# Altium footprint library Verdin Development Board.PcbLib: 154 footprints (part 9 of 10)
Each footprint in its own frame and in the unit in brackets; x right, y up, seen from the top. Pads: shape width x height; smd on the part's side, far side on the other; paste and mask are expansions set on the pad; w line width, h text height; cw(c..) or ccw(c..) is an arc to the next point about the centre after c.
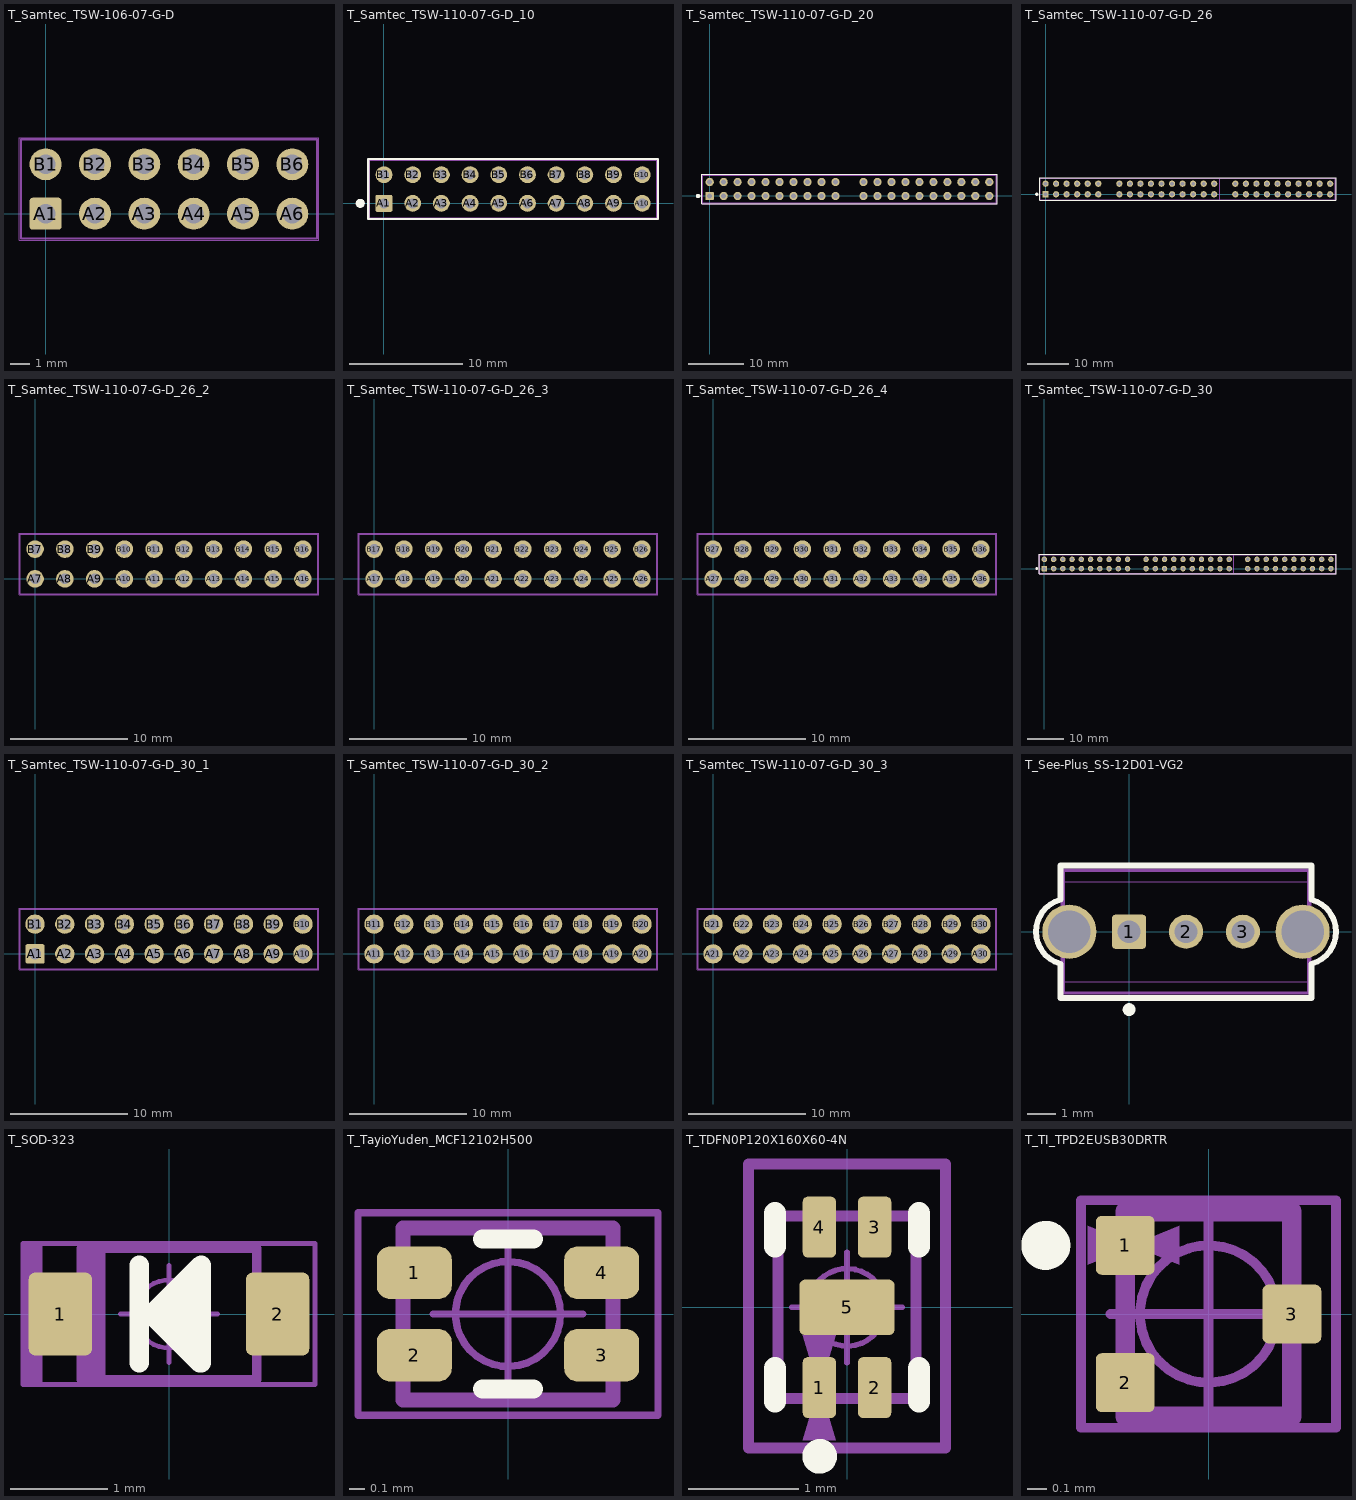
[diagram p8: the footprints below, top view; thin cyan lines are the x and y axes]

## T_Samtec_TSW-106-07-G-D [mm]
pads (12):
  rrect20% 1.65x1.65 hole 1: A1(0,0)
  round 1.65 hole 1: A2(2.54,0) A3(5.08,0) A4(7.62,0) A5(10.16,0) A6(12.7,0) B1(0,2.54) B2(2.54,2.54) B3(5.08,2.54) B4(7.62,2.54) B5(10.16,2.54) B6(12.7,2.54)
Top Component Outline:
  lines w0.05: -1.37,-1.37 -1.37,3.91 14.072,3.91 14.072,-1.37 -1.37,-1.37
Top 3D Body:
  lines w0.001: -1.27,-1.27 -1.27,3.81 13.97,3.81 13.97,-1.27 -1.27,-1.27
Top Dimensions:
  lines w0.1: -1.27,-1.27 13.97,-1.27 13.97,3.81 -1.27,3.81 -1.27,-1.27
Top Component Center:
  circle w0.05: c0,0 r0.35
  lines w0.05: -0.5,0 0.5,0 ; 0,-0.5 0,0.5
Top Assembly:
  text ".Designator" at 4.445,4.445 h0.75
3D body "TSW-106-07-G-D.stp": height 8.39, standoff -2.53, extent -1.27,-1.27 13.97,3.81

## T_Samtec_TSW-110-07-G-D_10 [mm]
pads (20):
  rrect20% 1.5x1.5 hole 0.9: A1(0,0)
  round 1.5 hole 0.9: A2(2.54,0) A3(5.08,0) A4(7.62,0) A5(10.16,0) A6(12.7,0) A7(15.24,0) A8(17.78,0) A9(20.32,0) A10(22.86,0) B1(0,2.54) B2(2.54,2.54) B3(5.08,2.54) B4(7.62,2.54) B5(10.16,2.54) B6(12.7,2.54) B7(15.24,2.54) B8(17.78,2.54) B9(20.32,2.54) B10(22.86,2.54)
Top Overlay:
  circle w0.4: c-2.1,0 r0.2
  lines w0.2: -1.395,-1.395 -1.395,3.935 24.257,3.935 24.257,-1.395 -1.395,-1.395
Top Component Outline:
  lines w0.05: -1.37,-1.37 -1.37,3.91 24.257,3.91 24.257,-1.37 -1.37,-1.37
Top 3D Body:
  lines w0.001: -1.27,-1.27 -1.27,3.81 24.13,3.81 24.13,-1.27 -1.27,-1.27
Top Dimensions:
  lines w0.1: -1.27,-1.27 24.13,-1.27 24.13,3.81 -1.27,3.81 -1.27,-1.27
Top Component Center:
  circle w0.05: c0,0 r0.35
  lines w0.05: -0.5,0 0.5,0 ; 0,-0.5 0,0.5
Top Assembly:
  text ".Designator" at 9.225,4.225 h0.75
3D body "Samtec-TSW-110-07-G-D.step": height 8.4, standoff -2.52, extent -1.27,-1.27 24.13,3.81

## T_Samtec_TSW-110-07-G-D_20 [mm]
pads (40):
  rrect20% 1.5x1.5 hole 0.9: A1(0,0)
  round 1.5 hole 0.9: A2(2.54,0) A3(5.08,0) A4(7.62,0) A5(10.16,0) A6(12.7,0) A7(15.24,0) A8(17.78,0) A9(20.32,0) A10(22.86,0) A11(27.94,0) A12(30.48,0) A13(33.02,0) A14(35.56,0) A15(38.1,0) A16(40.64,0) A17(43.18,0) A18(45.72,0) A19(48.26,0) A20(50.8,0) B1(0,2.54) B2(2.54,2.54) B3(5.08,2.54) B4(7.62,2.54) B5(10.16,2.54) B6(12.7,2.54) B7(15.24,2.54) B8(17.78,2.54) B9(20.32,2.54) B10(22.86,2.54) B11(27.94,2.54) B12(30.48,2.54) B13(33.02,2.54) B14(35.56,2.54) B15(38.1,2.54) B16(40.64,2.54) B17(43.18,2.54) B18(45.72,2.54) B19(48.26,2.54) B20(50.8,2.54)
Top Overlay:
  circle w0.4: c-2.1,0 r0.2
  lines w0.2: -1.395,-1.395 -1.395,3.935 52.195,3.935 52.195,-1.395 -1.395,-1.395
Top Component Outline:
  lines w0.05: -1.37,-1.37 -1.37,3.91 52.17,3.91 52.17,-1.37 -1.37,-1.37
Top 3D Body:
  lines w0.001: 52.07,-1.27 -1.27,-1.27 -1.27,3.81 52.07,3.81 ; 52.07,-1.27 52.07,3.81 ; 52.07,-1.27 52.07,3.81
Top Dimensions:
  lines w0.1: -1.27,-1.27 52.07,-1.27 52.07,3.81 -1.27,3.81 -1.27,-1.27
Top Component Center:
  circle w0.05: c0,0 r0.35
  lines w0.05: -0.5,0 0.5,0 ; 0,-0.5 0,0.5
Top Assembly:
  text ".Designator" at 23.625,4.425 h0.75
3D body "Samtec-TSW-110-07-G-D.step": height 8.4, standoff -2.52, extent 26.67,-1.27 52.07,3.81
3D body "Samtec-TSW-110-07-G-D.step": height 8.4, standoff -2.52, extent -1.27,-1.27 24.13,3.81

## T_Samtec_TSW-110-07-G-D_26 [mm]
pads (52):
  rrect20% 1.5x1.5 hole 0.9: A1(0,0)
  round 1.5 hole 0.9: A2(2.54,0) A3(5.08,0) A4(7.62,0) A5(10.16,0) A6(12.7,0) A7(17.78,0) A8(20.32,0) A9(22.86,0) A10(25.4,0) A11(27.94,0) A12(30.48,0) A13(33.02,0) A14(35.56,0) A15(38.1,0) A16(40.64,0) A17(45.72,0) A18(48.26,0) A19(50.8,0) A20(53.34,0) A21(55.88,0) A22(58.42,0) A23(60.96,0) A24(63.5,0) A25(66.04,0) A26(68.58,0) B1(0,2.54) B2(2.54,2.54) B3(5.08,2.54) B4(7.62,2.54) B5(10.16,2.54) B6(12.7,2.54) B7(17.78,2.54) B8(20.32,2.54) B9(22.86,2.54) B10(25.4,2.54) B11(27.94,2.54) B12(30.48,2.54) B13(33.02,2.54) B14(35.56,2.54) B15(38.1,2.54) B16(40.64,2.54) B17(45.72,2.54) B18(48.26,2.54) B19(50.8,2.54) B20(53.34,2.54) B21(55.88,2.54) B22(58.42,2.54) B23(60.96,2.54) B24(63.5,2.54) B25(66.04,2.54) B26(68.58,2.54)
Top Overlay:
  circle w0.4: c-2.1,0 r0.2
  lines w0.2: 69.952,-1.395 -1.395,-1.395 -1.395,3.935 69.977,3.935 69.977,-1.395
Top Component Outline:
  lines w0.05: -1.37,-1.37 69.952,-1.37 69.952,3.91 -1.37,3.91 -1.37,-1.37
Top 3D Body:
  lines w0.001: 52.07,-1.27 -1.27,-1.27 -1.27,3.81 52.07,3.81 ; 41.91,-1.27 41.91,3.81 41.91,-1.27
Top Dimensions:
  lines w0.1: -1.27,-1.27 -1.27,3.81 69.85,3.81 69.85,-1.27 -1.27,-1.27
Top Component Center:
  circle w0.05: c0,0 r0.35
  lines w0.05: -0.5,0 0.5,0 ; 0,-0.5 0,0.5
Top Assembly:
  text ".Designator" at 33.02,4.445 h0.75
3D body "TSW-106-07-G-D.stp": height 8.39, standoff -2.53, extent -1.27,-1.27 13.97,3.81
3D body "Samtec-TSW-110-07-G-D.step": height 8.4, standoff -2.52, extent 44.45,-1.27 69.85,3.81
3D body "Samtec-TSW-110-07-G-D.step": height 8.4, standoff -2.52, extent 16.51,-1.27 41.91,3.81

## T_Samtec_TSW-110-07-G-D_26_2 [mm]
pads (20):
  round 1.5 hole 0.9: A7(0,0) A8(2.54,0) A9(5.08,0) A10(7.62,0) A11(10.16,0) A12(12.7,0) A13(15.24,0) A14(17.78,0) A15(20.32,0) A16(22.86,0) B7(0,2.54) B8(2.54,2.54) B9(5.08,2.54) B10(7.62,2.54) B11(10.16,2.54) B12(12.7,2.54) B13(15.24,2.54) B14(17.78,2.54) B15(20.32,2.54) B16(22.86,2.54)
Top Component Outline:
  lines w0.05: -1.372,-1.37 24.232,-1.37 24.232,3.91 -1.372,3.91 -1.372,-1.37
Top 3D Body:
  lines w0.001: 24.13,-1.27 24.13,3.81 ; 24.13,-1.27 24.13,3.81 ; 24.13,-1.27 -1.27,-1.27 -1.27,3.81 24.13,3.81
Top Dimensions:
  lines w0.1: -1.27,-1.27 -1.27,3.81 24.13,3.81 24.13,-1.27 -1.27,-1.27
Top Component Center:
  circle w0.05: c0,0 r0.35
  lines w0.05: -0.5,0 0.5,0 ; 0,-0.5 0,0.5
Top Assembly:
  text ".Designator" at 10.795,4.445 h0.75
3D body "Samtec-TSW-110-07-G-D.step": height 8.4, standoff -2.52, extent -1.27,-1.27 24.13,3.81

## T_Samtec_TSW-110-07-G-D_26_3 [mm]
pads (20):
  round 1.5 hole 0.9: A17(0,0) A18(2.54,0) A19(5.08,0) A20(7.62,0) A21(10.16,0) A22(12.7,0) A23(15.24,0) A24(17.78,0) A25(20.32,0) A26(22.86,0) B17(0,2.54) B18(2.54,2.54) B19(5.08,2.54) B20(7.62,2.54) B21(10.16,2.54) B22(12.7,2.54) B23(15.24,2.54) B24(17.78,2.54) B25(20.32,2.54) B26(22.86,2.54)
Top Component Outline:
  lines w0.05: -1.37,-1.37 -1.37,3.91 24.232,3.91 24.232,-1.37 -1.37,-1.37
Top 3D Body:
  lines w0.001: -1.27,-1.27 -1.27,3.81 24.13,3.81 24.13,-1.27 -1.27,-1.27
Top Dimensions:
  lines w0.1: -1.27,-1.27 24.13,-1.27 24.13,3.81 -1.27,3.81 -1.27,-1.27
Top Component Center:
  circle w0.05: c0,0 r0.35
  lines w0.05: -0.5,0 0.5,0 ; 0,-0.5 0,0.5
Top Assembly:
  text ".Designator" at 10.16,4.445 h0.75
3D body "Samtec-TSW-110-07-G-D.step": height 8.4, standoff -2.52, extent -1.27,-1.27 24.13,3.81

## T_Samtec_TSW-110-07-G-D_26_4 [mm]
pads (20):
  round 1.5 hole 0.9: A27(0,0) A28(2.54,0) A29(5.08,0) A30(7.62,0) A31(10.16,0) A32(12.7,0) A33(15.24,0) A34(17.78,0) A35(20.32,0) A36(22.86,0) B27(0,2.54) B28(2.54,2.54) B29(5.08,2.54) B30(7.62,2.54) B31(10.16,2.54) B32(12.7,2.54) B33(15.24,2.54) B34(17.78,2.54) B35(20.32,2.54) B36(22.86,2.54)
Top Component Outline:
  lines w0.05: -1.37,-1.37 24.232,-1.37 24.232,3.91 -1.37,3.91 -1.37,-1.37
Top 3D Body:
  lines w0.001: -1.27,-1.27 24.13,-1.27 24.13,3.81 -1.27,3.81 -1.27,-1.27
Top Dimensions:
  lines w0.1: -1.27,-1.27 -1.27,3.81 24.13,3.81 24.13,-1.27 -1.27,-1.27
Top Component Center:
  circle w0.05: c0,0 r0.35
  lines w0.05: -0.5,0 0.5,0 ; 0,-0.5 0,0.5
Top Assembly:
  text ".Designator" at 10.16,4.445 h0.75
3D body "Samtec-TSW-110-07-G-D.step": height 8.4, standoff -2.52, extent -1.27,-1.27 24.13,3.81

## T_Samtec_TSW-110-07-G-D_30 [mm]
pads (60):
  rrect20% 1.5x1.5 hole 0.9: A1(0,0)
  round 1.5 hole 0.9: A2(2.54,0) A3(5.08,0) A4(7.62,0) A5(10.16,0) A6(12.7,0) A7(15.24,0) A8(17.78,0) A9(20.32,0) A10(22.86,0) A11(27.94,0) A12(30.48,0) A13(33.02,0) A14(35.56,0) A15(38.1,0) A16(40.64,0) A17(43.18,0) A18(45.72,0) A19(48.26,0) A20(50.8,0) A21(55.88,0) A22(58.42,0) A23(60.96,0) A24(63.5,0) A25(66.04,0) A26(68.58,0) A27(71.12,0) A28(73.66,0) A29(76.2,0) A30(78.74,0) B1(0,2.54) B2(2.54,2.54) B3(5.08,2.54) B4(7.62,2.54) B5(10.16,2.54) B6(12.7,2.54) B7(15.24,2.54) B8(17.78,2.54) B9(20.32,2.54) B10(22.86,2.54) B11(27.94,2.54) B12(30.48,2.54) B13(33.02,2.54) B14(35.56,2.54) B15(38.1,2.54) B16(40.64,2.54) B17(43.18,2.54) B18(45.72,2.54) B19(48.26,2.54) B20(50.8,2.54) B21(55.88,2.54) B22(58.42,2.54) B23(60.96,2.54) B24(63.5,2.54) B25(66.04,2.54) B26(68.58,2.54) B27(71.12,2.54) B28(73.66,2.54) B29(76.2,2.54) B30(78.74,2.54)
Top Overlay:
  circle w0.4: c-2.1,0 r0.2
  lines w0.2: -1.395,-1.395 -1.395,3.935 80.137,3.935 80.137,-1.395 -1.395,-1.395
Top Component Outline:
  lines w0.05: -1.37,-1.37 -1.37,3.91 80.112,3.91 80.112,-1.37 -1.37,-1.37
Top 3D Body:
  lines w0.001: 52.07,-1.27 -1.27,-1.27 -1.27,3.81 52.07,3.81 ; 52.07,-1.27 52.07,3.81 ; 52.07,-1.27 52.07,3.81
Top Dimensions:
  lines w0.1: -1.27,-1.27 80.01,-1.27 80.01,3.81 -1.27,3.81 -1.27,-1.27
Top Component Center:
  circle w0.05: c0,0 r0.35
  lines w0.05: -0.5,0 0.5,0 ; 0,-0.5 0,0.5
Top Assembly:
  text ".Designator" at 23.625,4.425 h0.75
3D body "Samtec-TSW-110-07-G-D.step": height 8.4, standoff -2.52, extent 26.67,-1.27 52.07,3.81
3D body "Samtec-TSW-110-07-G-D.step": height 8.4, standoff -2.52, extent -1.27,-1.27 24.13,3.81
3D body "Samtec-TSW-110-07-G-D.step": height 8.4, standoff -2.52, extent 54.61,-1.27 80.01,3.81

## T_Samtec_TSW-110-07-G-D_30_1 [mm]
pads (20):
  rrect20% 1.65x1.65 hole 1: A1(0,0)
  round 1.65 hole 1: A2(2.54,0) A3(5.08,0) A4(7.62,0) A5(10.16,0) A6(12.7,0) A7(15.24,0) A8(17.78,0) A9(20.32,0) A10(22.86,0) B1(0,2.54) B2(2.54,2.54) B3(5.08,2.54) B4(7.62,2.54) B5(10.16,2.54) B6(12.7,2.54) B7(15.24,2.54) B8(17.78,2.54) B9(20.32,2.54) B10(22.86,2.54)
Top Component Outline:
  lines w0.05: -1.372,-1.37 24.232,-1.37 24.232,3.91 -1.372,3.91 -1.372,-1.37
Top 3D Body:
  lines w0.001: -1.27,-1.27 24.13,-1.27 24.13,3.81 -1.27,3.81 -1.27,-1.27
Top Dimensions:
  lines w0.1: -1.27,-1.27 -1.27,3.81 24.13,3.81 24.13,-1.27 -1.27,-1.27
Top Component Center:
  circle w0.05: c0,0 r0.35
  lines w0.05: -0.5,0 0.5,0 ; 0,-0.5 0,0.5
Top Assembly:
  text ".Designator" at 9.525,4.445 h0.75
3D body "Samtec-TSW-110-07-G-D.step": height 8.4, standoff -2.52, extent -1.27,-1.27 24.13,3.81

## T_Samtec_TSW-110-07-G-D_30_2 [mm]
pads (20):
  round 1.65 hole 1: A11(0,0) A12(2.54,0) A13(5.08,0) A14(7.62,0) A15(10.16,0) A16(12.7,0) A17(15.24,0) A18(17.78,0) A19(20.32,0) A20(22.86,0) B11(0,2.54) B12(2.54,2.54) B13(5.08,2.54) B14(7.62,2.54) B15(10.16,2.54) B16(12.7,2.54) B17(15.24,2.54) B18(17.78,2.54) B19(20.32,2.54) B20(22.86,2.54)
Top Component Outline:
  lines w0.05: -1.372,-1.37 -1.372,3.91 24.232,3.91 24.232,-1.37 -1.372,-1.37
Top 3D Body:
  lines w0.001: 24.13,-1.27 -1.27,-1.27 -1.27,3.81 24.13,3.81 ; 24.13,-1.27 24.13,3.81 ; 24.13,-1.27 24.13,3.81
Top Dimensions:
  lines w0.1: -1.27,-1.27 24.13,-1.27 24.13,3.81 -1.27,3.81 -1.27,-1.27
Top Component Center:
  circle w0.05: c0,0 r0.35
  lines w0.05: -0.5,0 0.5,0 ; 0,-0.5 0,0.5
Top Assembly:
  text ".Designator" at 9.525,4.445 h0.75
3D body "Samtec-TSW-110-07-G-D.step": height 8.4, standoff -2.52, extent -1.27,-1.27 24.13,3.81

## T_Samtec_TSW-110-07-G-D_30_3 [mm]
pads (20):
  round 1.65 hole 1: A21(0,0) A22(2.54,0) A23(5.08,0) A24(7.62,0) A25(10.16,0) A26(12.7,0) A27(15.24,0) A28(17.78,0) A29(20.32,0) A30(22.86,0) B21(0,2.54) B22(2.54,2.54) B23(5.08,2.54) B24(7.62,2.54) B25(10.16,2.54) B26(12.7,2.54) B27(15.24,2.54) B28(17.78,2.54) B29(20.32,2.54) B30(22.86,2.54)
Top Component Outline:
  lines w0.05: -1.372,-1.37 24.232,-1.37 24.232,3.91 -1.372,3.91 -1.372,-1.37
Top 3D Body:
  lines w0.001: 24.13,-1.27 -1.27,-1.27 -1.27,3.81 24.13,3.81 ; 24.13,-1.27 24.13,3.81 ; 24.13,-1.27 24.13,3.81
Top Dimensions:
  lines w0.1: -1.27,-1.27 -1.27,3.81 24.13,3.81 24.13,-1.27 -1.27,-1.27
Top Component Center:
  circle w0.05: c0,0 r0.35
  lines w0.05: -0.5,0 0.5,0 ; 0,-0.5 0,0.5
Top Assembly:
  text ".Designator" at 9.525,4.445 h0.75
3D body "Samtec-TSW-110-07-G-D.step": height 8.4, standoff -2.52, extent -1.27,-1.27 24.13,3.81

## T_See-Plus_SS-12D01-VG2 [mm]
pads (5):
  rrect20% 1.2x1.2 hole 0.8: 1(0,0)
  round 1.2 hole 0.8: 2(2,0) 3(4,0)
  round 1.9 hole 1.5: ""(-2.1,0) ""(6.1,0)
Top Overlay:
  circle w0.25: c0,-2.735 r0.1
  lines w0.2: -2.423,1.124 ccw(c-2.1,0) -2.422,-1.125 ; -2.41,-1.13 -2.41,-2.325 6.41,-2.325 6.41,-1.13 ; -2.41,1.13 -2.41,2.325 6.41,2.325 6.41,1.13 ; 6.422,1.125 cw(c6.1,0) 6.423,-1.124
Top Component Outline:
  lines w0.05: -2.38,-2.25 6.38,-2.25 6.38,2.25 -2.38,2.25 -2.38,-2.25
Top 3D Body:
  lines w0.001: -2.3,-1.75 6.3,-1.75 6.3,1.75 -2.3,1.75 -2.3,-1.75
Top Dimensions:
  lines w0.1: -2.3,-2.15 6.3,-2.15 6.3,2.15 -2.3,2.15 -2.3,-2.15
Top Component Center:
  circle w0.05: c0,0 r0.35
  lines w0.05: -0.5,0 0.5,0 ; 0,-0.5 0,0.5
Top Assembly:
  text ".Designator" at 0.35,2.65 h0.75
3D body: height 3.5, standoff 0, extent -2.3,-2.15 6.3,2.15
3D body: height 6.5, standoff 3.5, extent -0.711,-0.711 0.711,0.711

## T_SOD-323 [mm]
pads (2):
  rrect20% 0.65x0.85 smd: 1(-1.115,0) 2(1.115,0)
Top Overlay:
  lines w0.2: -0.305,-0.502 -0.305,0.502 ; 0.051,-0.21 0.051,0.197 ; 0.203,-0.351 0.203,0.349 ; 0.318,-0.502 -0.178,-0.006 0.33,0.502 0.33,-0.502
Top Component Outline:
  rectangle: -1.5,-0.725 -1.3,0.725
  lines w0.05: -1.5,-0.725 -1.5,0.725 1.5,0.725 1.5,-0.725 -1.5,-0.725
Top 3D Body:
  lines w0.001: -0.9,-0.2 -1.35,-0.2 -1.35,0.2 -0.9,0.2 ; 0.9,-0.2 1.35,-0.2 1.35,0.2 0.9,0.2 ; -0.9,-0.675 -0.9,0.675 0.9,0.675 0.9,-0.675 -0.9,-0.675
Top Dimensions:
  rectangle: -0.9,-0.675 -0.65,0.675
  lines w0.1: -0.9,-0.675 -0.9,0.675 0.9,0.675 0.9,-0.675 -0.9,-0.675
Top Component Center:
  circle w0.05: c0,0 r0.35
  lines w0.05: -0.5,0 0.5,0 ; 0,-0.5 0,0.5
Top Assembly:
  text ".Designator" at -1.625,0.825 h0.75
3D body "User Library-SOD323.step": height 0.9, standoff -0.09, extent -1.25,-0.625 1.25,0.625

## T_TayioYuden_MCF12102H500 [mm]
pads (4):
  rrect50% 0.5x0.35 smd: 1(-0.625,0.275) 2(-0.625,-0.275) 3(0.625,-0.275) 4(0.625,0.275)
Top Overlay:
  lines w0.127: -0.17,-0.5 0.17,-0.5 ; -0.17,0.5 0.17,0.5
Top Component Outline:
  lines w0.05: -1,-0.675 1,-0.675 1,0.675 -1,0.675 -1,-0.675
Top 3D Body:
  lines w0.01: -0.7,-0.575 -0.7,0.575 0.7,0.575 0.7,-0.575 -0.7,-0.575
Top Dimensions:
  lines w0.1: -0.7,-0.575 0.7,-0.575 0.7,0.575 -0.7,0.575 -0.7,-0.575
Top Component Center:
  circle w0.05: c0,0 r0.35
  lines w0.05: -0.5,0 0.5,0 ; 0,-0.5 0,0.5
Top Assembly:
  text ".Designator" at -1.625,1.075 h0.75
3D body "test-22.step": height 0.65, standoff 0, extent -0.75,-0.575 0.75,0.575

## T_TDFN0P120X160X60-4N [mm]
pads (5):
  rrect30% 0.3x0.55 smd: 1(-0.25,-0.725) 2(0.25,-0.725) 3(0.25,0.725) 4(-0.25,0.725)
  rrect20% 0.86x0.5 smd paste-0.05: 5(0,0)
Top Overlay:
  circle w0.175: c-0.247,-1.346 r0.069
  lines w0.2: -0.65,-0.85 -0.65,-0.55 ; -0.65,0.55 -0.65,0.85 ; 0.65,-0.85 0.65,-0.55 ; 0.65,0.55 0.65,0.85
Top Component Outline:
  region: -0.1,-1.2 -0.25,-0.7 -0.4,-1.2
  lines w0.1: -0.889,-1.27 -0.889,1.295 0.889,1.295 0.889,-1.27 -0.889,-1.27
Top Dimensions:
  region: -0.4,-0.25 -0.25,-0.75 -0.1,-0.25
  lines w0.1: -0.625,-0.825 -0.625,0.825 0.625,0.825 0.625,-0.825 -0.625,-0.825
Top Component Center:
  circle w0.05: c0,0 r0.35
  lines w0.05: -0.5,0 0.5,0 ; 0,-0.5 0,0.5
Top Assembly:
  text ".Designator" at -1.6,1.625 h0.75
3D body "test-24.step": height 0.6, standoff 0, extent -0.625,-0.826 0.625,0.826

## T_TI_TPD2EUSB30DRTR [mm]
pads (3):
  rrect20% 0.3x0.3 smd mask+0.05: 1(-0.425,0.35) 2(-0.425,-0.35) 3(0.425,0)
Top Overlay:
  circle w0.15: c-0.83,0.35 r0.05
Top Component Outline:
  region: -0.375,0.35 -0.616,0.25 -0.616,0.45
  lines w0.05: -0.65,-0.58 0.65,-0.58 0.65,0.58 -0.65,0.58 -0.65,-0.58
Top 3D Body:
  lines w0.01: -0.425,-0.523 0.425,-0.523 0.425,0.523 -0.425,0.523 -0.425,-0.523
Top Dimensions:
  region: -0.39,0.35 -0.15,0.45 -0.15,0.25
  lines w0.1: -0.425,-0.523 0.425,-0.523 0.425,0.523 -0.425,0.523 -0.425,-0.523
Top Component Center:
  circle w0.05: c0,0 r0.35
  lines w0.05: -0.5,0 0.5,0 ; 0,-0.5 0,0.5
Top Assembly:
  text ".Designator" at -1.625,0.875 h0.75
3D body "test-25.step": height 0.5, standoff 0, extent -0.5,-0.523 0.5,0.523